# Altium footprint library Miscellaneous Connectors.PcbLib: 245 footprints (part 14 of 16)
Each footprint in its own frame and in the unit in brackets; x right, y up, seen from the top. Pads: shape width x height; smd on the part's side, far side on the other; paste and mask are expansions set on the pad; w line width, h text height; cw(c..) or ccw(c..) is an arc to the next point about the centre after c.
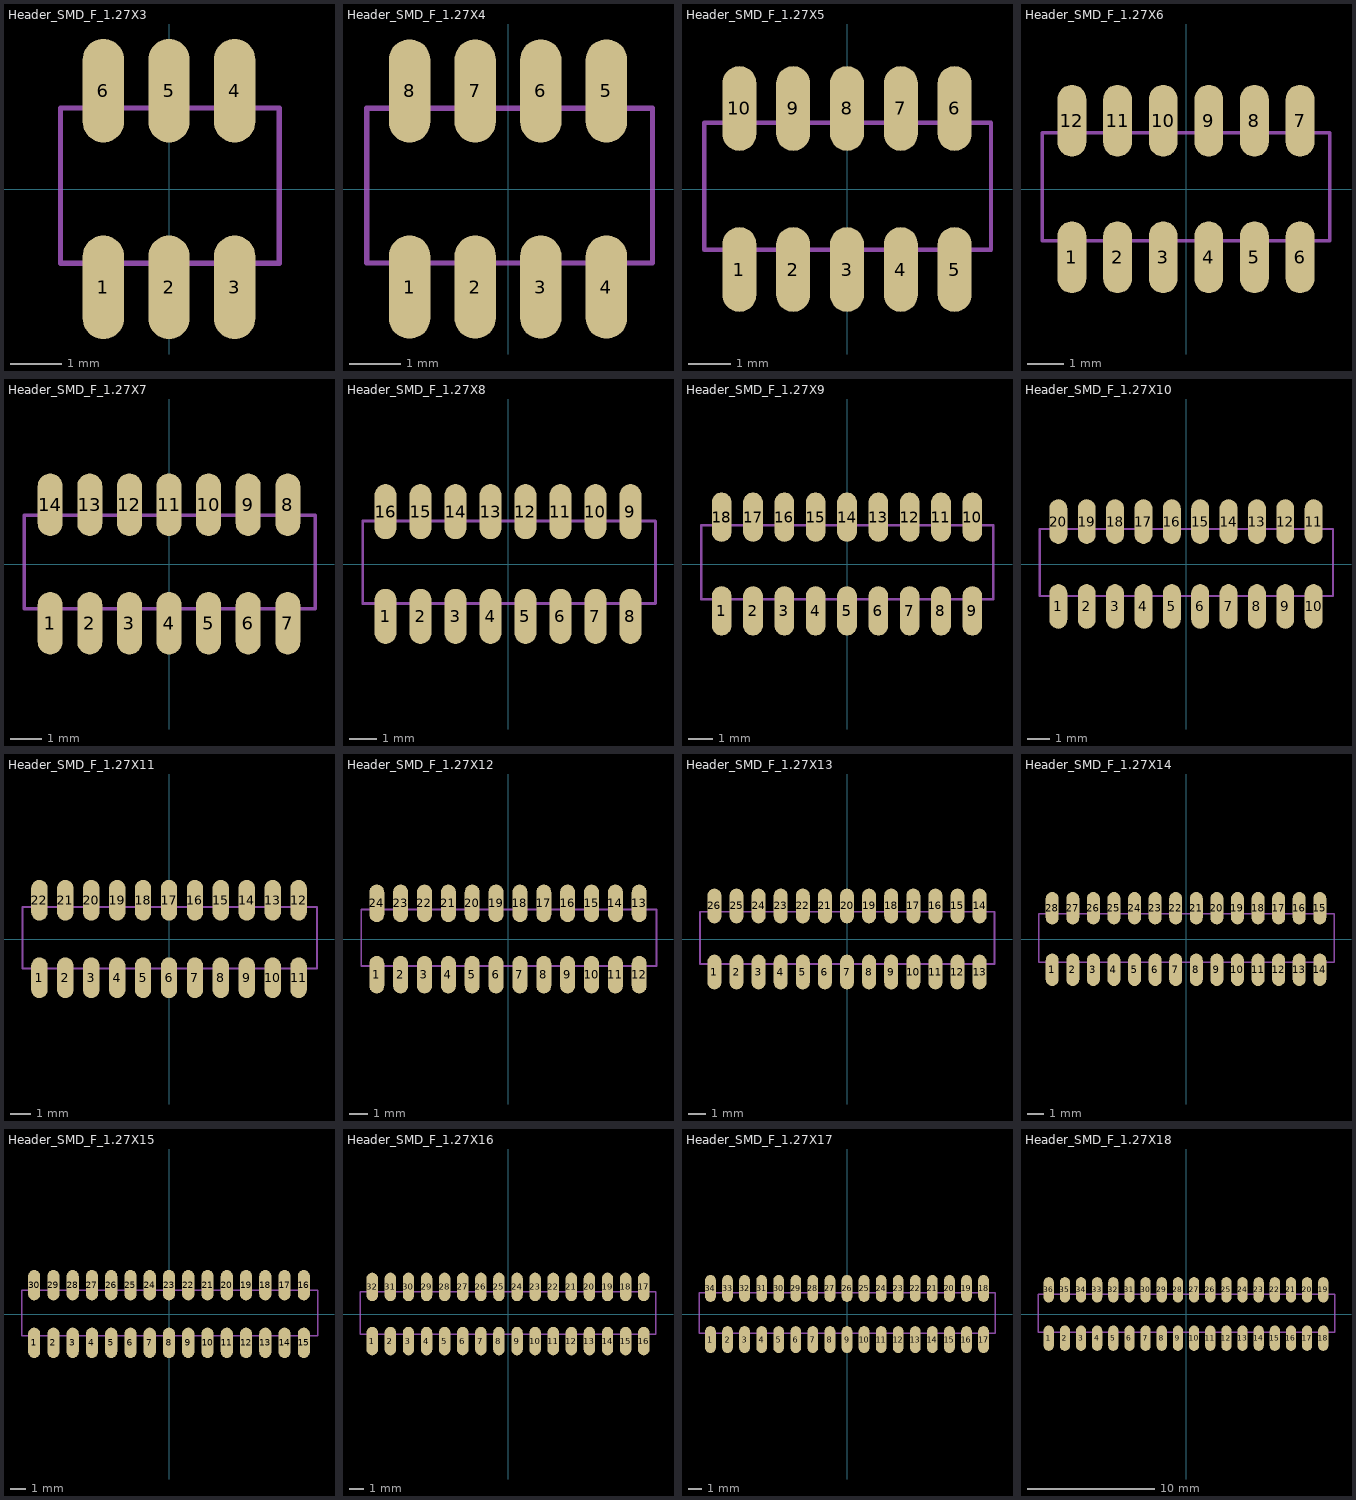
[diagram p13: the footprints below, top view; thin cyan lines are the x and y axes]

## Header_SMD_F_1.27X3 [mm]
pads (6):
  oval 0.8x2 smd: 1(-1.27,-1.9) 2(0,-1.9) 3(1.27,-1.9) 4(1.27,1.9) 5(0,1.9) 6(-1.27,1.9)
Mechanical 15:
  lines w0.1: -2.1,-1.435 2.13,-1.435 2.13,1.565 -2.1,1.565 -2.1,-1.435
3D body: height 4.5, standoff 0, extent -2.1,-2.335 2.11,2.265

## Header_SMD_F_1.27X4 [mm]
pads (8):
  oval 0.8x2 smd: 1(-1.905,-1.9) 2(-0.635,-1.9) 3(0.635,-1.9) 4(1.905,-1.9) 5(1.905,1.9) 6(0.635,1.9) 7(-0.635,1.9) 8(-1.905,1.9)
Mechanical 15:
  lines w0.1: -2.735,-1.435 2.8,-1.435 2.8,1.565 -2.735,1.565 -2.735,-1.435
3D body: height 4.5, standoff 0, extent -2.735,-2.335 2.745,2.265

## Header_SMD_F_1.27X5 [mm]
pads (10):
  oval 0.8x2 smd: 1(-2.54,-1.9) 2(-1.27,-1.9) 3(0,-1.9) 4(1.27,-1.9) 5(2.54,-1.9) 6(2.54,1.9) 7(1.27,1.9) 8(0,1.9) 9(-1.27,1.9) 10(-2.54,1.9)
Mechanical 15:
  lines w0.1: -3.37,-1.435 3.4,-1.435 3.4,1.565 -3.37,1.565 -3.37,-1.435
3D body: height 4.5, standoff 0, extent -3.37,-2.335 3.38,2.265

## Header_SMD_F_1.27X6 [mm]
pads (12):
  oval 0.8x2 smd: 1(-3.175,-1.9) 2(-1.905,-1.9) 3(-0.635,-1.9) 4(0.635,-1.9) 5(1.905,-1.9) 6(3.175,-1.9) 7(3.175,1.9) 8(1.905,1.9) 9(0.635,1.9) 10(-0.635,1.9) 11(-1.905,1.9) 12(-3.175,1.9)
Mechanical 15:
  lines w0.1: -4.005,-1.435 -4.005,1.565 4,1.565 4,-1.435 -4.005,-1.435
3D body: height 4.5, standoff 0, extent -4.005,-2.335 4.015,2.265

## Header_SMD_F_1.27X7 [mm]
pads (14):
  oval 0.8x2 smd: 1(-3.81,-1.9) 2(-2.54,-1.9) 3(-1.27,-1.9) 4(0,-1.9) 5(1.27,-1.9) 6(2.54,-1.9) 7(3.81,-1.9) 8(3.81,1.9) 9(2.54,1.9) 10(1.27,1.9) 11(0,1.9) 12(-1.27,1.9) 13(-2.54,1.9) 14(-3.81,1.9)
Mechanical 15:
  lines w0.1: -4.64,-1.435 4.69,-1.435 4.69,1.565 -4.64,1.565 -4.64,-1.435
3D body: height 4.5, standoff 0, extent -4.64,-2.335 4.65,2.265

## Header_SMD_F_1.27X8 [mm]
pads (16):
  oval 0.8x2 smd: 1(-4.445,-1.9) 2(-3.175,-1.9) 3(-1.905,-1.9) 4(-0.635,-1.9) 5(0.635,-1.9) 6(1.905,-1.9) 7(3.175,-1.9) 8(4.445,-1.9) 9(4.445,1.9) 10(3.175,1.9) 11(1.905,1.9) 12(0.635,1.9) 13(-0.635,1.9) 14(-1.905,1.9) 15(-3.175,1.9) 16(-4.445,1.9)
Mechanical 15:
  lines w0.1: -5.275,-1.435 -5.275,1.565 5.355,1.565 5.355,-1.435 -5.275,-1.435
3D body: height 4.5, standoff 0, extent -5.275,-2.335 5.285,2.265

## Header_SMD_F_1.27X9 [mm]
pads (18):
  oval 0.8x2 smd: 1(-5.08,-1.9) 2(-3.81,-1.9) 3(-2.54,-1.9) 4(-1.27,-1.9) 5(0,-1.9) 6(1.27,-1.9) 7(2.54,-1.9) 8(3.81,-1.9) 9(5.08,-1.9) 10(5.08,1.9) 11(3.81,1.9) 12(2.54,1.9) 13(1.27,1.9) 14(0,1.9) 15(-1.27,1.9) 16(-2.54,1.9) 17(-3.81,1.9) 18(-5.08,1.9)
Mechanical 15:
  lines w0.1: -5.91,-1.435 5.92,-1.435 5.92,1.565 -5.91,1.565 -5.91,-1.435
3D body: height 4.5, standoff 0, extent -5.91,-2.335 5.92,2.265

## Header_SMD_F_1.27X10 [mm]
pads (20):
  oval 0.8x2 smd: 1(-5.715,-1.9) 2(-4.445,-1.9) 3(-3.175,-1.9) 4(-1.905,-1.9) 5(-0.635,-1.9) 6(0.635,-1.9) 7(1.905,-1.9) 8(3.175,-1.9) 9(4.445,-1.9) 10(5.715,-1.9) 11(5.715,1.9) 12(4.445,1.9) 13(3.175,1.9) 14(1.905,1.9) 15(0.635,1.9) 16(-0.635,1.9) 17(-1.905,1.9) 18(-3.175,1.9) 19(-4.445,1.9) 20(-5.715,1.9)
Mechanical 15:
  lines w0.1: -6.545,-1.435 -6.545,1.565 6.585,1.565 6.585,-1.435 -6.545,-1.435
3D body: height 4.5, standoff 0, extent -6.545,-2.335 6.555,2.265

## Header_SMD_F_1.27X11 [mm]
pads (22):
  oval 0.8x2 smd: 1(-6.35,-1.9) 2(-5.08,-1.9) 3(-3.81,-1.9) 4(-2.54,-1.9) 5(-1.27,-1.9) 6(0,-1.9) 7(1.27,-1.9) 8(2.54,-1.9) 9(3.81,-1.9) 10(5.08,-1.9) 11(6.35,-1.9) 12(6.35,1.9) 13(5.08,1.9) 14(3.81,1.9) 15(2.54,1.9) 16(1.27,1.9) 17(0,1.9) 18(-1.27,1.9) 19(-2.54,1.9) 20(-3.81,1.9) 21(-5.08,1.9) 22(-6.35,1.9)
Mechanical 15:
  lines w0.1: -7.18,-1.435 -7.18,1.565 7.25,1.565 7.25,-1.435 -7.18,-1.435
3D body: height 4.5, standoff 0, extent -7.18,-2.335 7.19,2.265

## Header_SMD_F_1.27X12 [mm]
pads (24):
  oval 0.8x2 smd: 1(-6.985,-1.9) 2(-5.715,-1.9) 3(-4.445,-1.9) 4(-3.175,-1.9) 5(-1.905,-1.9) 6(-0.635,-1.9) 7(0.635,-1.9) 8(1.905,-1.9) 9(3.175,-1.9) 10(4.445,-1.9) 11(5.715,-1.9) 12(6.985,-1.9) 13(6.985,1.9) 14(5.715,1.9) 15(4.445,1.9) 16(3.175,1.9) 17(1.905,1.9) 18(0.635,1.9) 19(-0.635,1.9) 20(-1.905,1.9) 21(-3.175,1.9) 22(-4.445,1.9) 23(-5.715,1.9) 24(-6.985,1.9)
Mechanical 15:
  lines w0.1: -7.815,-1.435 7.9,-1.435 7.9,1.565 -7.815,1.565 -7.815,-1.435
3D body: height 4.5, standoff 0, extent -7.815,-2.335 7.825,2.265

## Header_SMD_F_1.27X13 [mm]
pads (26):
  oval 0.8x2 smd: 1(-7.62,-1.9) 2(-6.35,-1.9) 3(-5.08,-1.9) 4(-3.81,-1.9) 5(-2.54,-1.9) 6(-1.27,-1.9) 7(0,-1.9) 8(1.27,-1.9) 9(2.54,-1.9) 10(3.81,-1.9) 11(5.08,-1.9) 12(6.35,-1.9) 13(7.62,-1.9) 14(7.62,1.9) 15(6.35,1.9) 16(5.08,1.9) 17(3.81,1.9) 18(2.54,1.9) 19(1.27,1.9) 20(0,1.9) 21(-1.27,1.9) 22(-2.54,1.9) 23(-3.81,1.9) 24(-5.08,1.9) 25(-6.35,1.9) 26(-7.62,1.9)
Mechanical 15:
  lines w0.1: -8.45,-1.435 8.48,-1.435 8.48,1.565 -8.45,1.565 -8.45,-1.435
3D body: height 4.5, standoff 0, extent -8.45,-2.335 8.46,2.265

## Header_SMD_F_1.27X14 [mm]
pads (28):
  oval 0.8x2 smd: 1(-8.255,-1.9) 2(-6.985,-1.9) 3(-5.715,-1.9) 4(-4.445,-1.9) 5(-3.175,-1.9) 6(-1.905,-1.9) 7(-0.635,-1.9) 8(0.635,-1.9) 9(1.905,-1.9) 10(3.175,-1.9) 11(4.445,-1.9) 12(5.715,-1.9) 13(6.985,-1.9) 14(8.255,-1.9) 15(8.255,1.9) 16(6.985,1.9) 17(5.715,1.9) 18(4.445,1.9) 19(3.175,1.9) 20(1.905,1.9) 21(0.635,1.9) 22(-0.635,1.9) 23(-1.905,1.9) 24(-3.175,1.9) 25(-4.445,1.9) 26(-5.715,1.9) 27(-6.985,1.9) 28(-8.255,1.9)
Mechanical 15:
  lines w0.1: -9.085,-1.435 -9.085,1.565 9.145,1.565 9.145,-1.435 -9.085,-1.435
3D body: height 4.5, standoff 0, extent -9.085,-2.335 9.095,2.265

## Header_SMD_F_1.27X15 [mm]
pads (30):
  oval 0.8x2 smd: 1(-8.89,-1.9) 2(-7.62,-1.9) 3(-6.35,-1.9) 4(-5.08,-1.9) 5(-3.81,-1.9) 6(-2.54,-1.9) 7(-1.27,-1.9) 8(0,-1.9) 9(1.27,-1.9) 10(2.54,-1.9) 11(3.81,-1.9) 12(5.08,-1.9) 13(6.35,-1.9) 14(7.62,-1.9) 15(8.89,-1.9) 16(8.89,1.9) 17(7.62,1.9) 18(6.35,1.9) 19(5.08,1.9) 20(3.81,1.9) 21(2.54,1.9) 22(1.27,1.9) 23(0,1.9) 24(-1.27,1.9) 25(-2.54,1.9) 26(-3.81,1.9) 27(-5.08,1.9) 28(-6.35,1.9) 29(-7.62,1.9) 30(-8.89,1.9)
Mechanical 15:
  lines w0.1: -9.72,-1.435 9.81,-1.435 9.81,1.565 -9.72,1.565 -9.72,-1.435
3D body: height 4.5, standoff 0, extent -9.72,-2.335 9.73,2.265

## Header_SMD_F_1.27X16 [mm]
pads (32):
  oval 0.8x2 smd: 1(-9.525,-1.9) 2(-8.255,-1.9) 3(-6.985,-1.9) 4(-5.715,-1.9) 5(-4.445,-1.9) 6(-3.175,-1.9) 7(-1.905,-1.9) 8(-0.635,-1.9) 9(0.635,-1.9) 10(1.905,-1.9) 11(3.175,-1.9) 12(4.445,-1.9) 13(5.715,-1.9) 14(6.985,-1.9) 15(8.255,-1.9) 16(9.525,-1.9) 17(9.525,1.9) 18(8.255,1.9) 19(6.985,1.9) 20(5.715,1.9) 21(4.445,1.9) 22(3.175,1.9) 23(1.905,1.9) 24(0.635,1.9) 25(-0.635,1.9) 26(-1.905,1.9) 27(-3.175,1.9) 28(-4.445,1.9) 29(-5.715,1.9) 30(-6.985,1.9) 31(-8.255,1.9) 32(-9.525,1.9)
Mechanical 15:
  lines w0.1: -10.355,-1.435 -10.355,1.565 10.375,1.565 10.375,-1.435 -10.355,-1.435
3D body: height 4.5, standoff 0, extent -10.355,-2.335 10.365,2.265

## Header_SMD_F_1.27X17 [mm]
pads (34):
  oval 0.8x2 smd: 1(-10.16,-1.9) 2(-8.89,-1.9) 3(-7.62,-1.9) 4(-6.35,-1.9) 5(-5.08,-1.9) 6(-3.81,-1.9) 7(-2.54,-1.9) 8(-1.27,-1.9) 9(0,-1.9) 10(1.27,-1.9) 11(2.54,-1.9) 12(3.81,-1.9) 13(5.08,-1.9) 14(6.35,-1.9) 15(7.62,-1.9) 16(8.89,-1.9) 17(10.16,-1.9) 18(10.16,1.9) 19(8.89,1.9) 20(7.62,1.9) 21(6.35,1.9) 22(5.08,1.9) 23(3.81,1.9) 24(2.54,1.9) 25(1.27,1.9) 26(0,1.9) 27(-1.27,1.9) 28(-2.54,1.9) 29(-3.81,1.9) 30(-5.08,1.9) 31(-6.35,1.9) 32(-7.62,1.9) 33(-8.89,1.9) 34(-10.16,1.9)
Mechanical 15:
  lines w0.1: -10.99,-1.435 11.04,-1.435 11.04,1.565 -10.99,1.565 -10.99,-1.435
3D body: height 4.5, standoff 0, extent -10.99,-2.335 11,2.265

## Header_SMD_F_1.27X18 [mm]
pads (36):
  oval 0.8x2 smd: 1(-10.795,-1.9) 2(-9.525,-1.9) 3(-8.255,-1.9) 4(-6.985,-1.9) 5(-5.715,-1.9) 6(-4.445,-1.9) 7(-3.175,-1.9) 8(-1.905,-1.9) 9(-0.635,-1.9) 10(0.635,-1.9) 11(1.905,-1.9) 12(3.175,-1.9) 13(4.445,-1.9) 14(5.715,-1.9) 15(6.985,-1.9) 16(8.255,-1.9) 17(9.525,-1.9) 18(10.795,-1.9) 19(10.795,1.9) 20(9.525,1.9) 21(8.255,1.9) 22(6.985,1.9) 23(5.715,1.9) 24(4.445,1.9) 25(3.175,1.9) 26(1.905,1.9) 27(0.635,1.9) 28(-0.635,1.9) 29(-1.905,1.9) 30(-3.175,1.9) 31(-4.445,1.9) 32(-5.715,1.9) 33(-6.985,1.9) 34(-8.255,1.9) 35(-9.525,1.9) 36(-10.795,1.9)
Mechanical 15:
  lines w0.1: -11.625,-1.435 -11.625,1.565 11.705,1.565 11.705,-1.435 -11.625,-1.435
3D body: height 4.5, standoff 0, extent -11.625,-2.335 11.635,2.265